# Altium schematic symbol library CzytnikKartSD.SchLib: 1 symbol
Pins are listed as number, name and electrical type; pins without a type are passive.

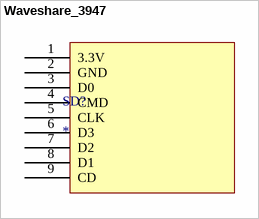
[diagram p0: symbol Waveshare_3947]

## Waveshare_3947
designator SD?
footprint Waveshare_3947
pins: 1 3.3V, 2 GND, 3 D0, 4 CMD, 5 CLK, 6 D3, 7 D2, 8 D1, 9 CD